# Altium integrated library VIETTIEN.IntLib: 150 symbols (part 4 of 7)

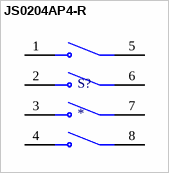
[diagram p69: symbol JS0204AP4-R]

## JS0204AP4-R
designator S?
Công Tắc DIP Switch Dán SMD 4 Bit 2.54mm; MP: JS0204AP4-R; Package: None; Price: None; Value: *; Availability: Unavailable
footprint SW_JS0204AP4-R
pins: 1, 2, 3, 4, 5, 6, 7, 8


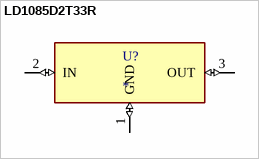
[diagram p70: symbol LD1085D2T33R]

## LD1085D2T33R
designator U?
Linear Voltage Regulator IC Positive Fixed 1 Output 3A D2PAK; MF: STMicroelectronics; MP: LD1085D2T33R; SnapEDA_Link: https://www.snapeda.com/parts/LD1085D2T33R/STMicroelectronics/view-part/?ref=snap; Package: TO-263-3 STMicroelectronics; Value: *; Check_prices: https://www.snapeda.com/parts/LD1085D2T33R/STMicroelectronics/view-part/?ref=eda
footprint LD1085D2T33R
pins: 1 GND (io), 2 IN (io), 3 OUT (io)


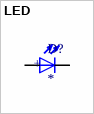
[diagram p71: symbol LED]

## LED
designator D?
WL-TMRC_5MM; MF: {'manufacturer': u'Wurth Electronics'}; MP: 151051RS11000; Package: None; Price: None; Value: *; Availability: Unavailable
footprint WL-TMRC_5MM
pins: 1 POS, 2 NEG
text: +


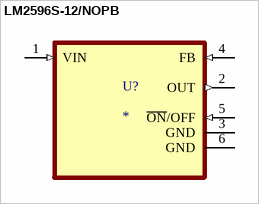
[diagram p72: symbol LM2596S-12/NOPB]

## LM2596S-12/NOPB
designator U?
SIMPLE SWITCHERÂ® 4.5V to 40V, 3A Low Component Count Step-Down Regulator; MF: Texas Instruments; MP: LM2596S-12/NOPB; SnapEDA_Link: https://www.snapeda.com/parts/LM2596S-12/NOPB/Texas+Instruments/view-part/?ref=snap; Package: TO-263-5 Texas Instruments; Value: *; Check_prices: https://www.snapeda.com/parts/LM2596S-12/NOPB/Texas+Instruments/view-part/?ref=eda
footprint VREG_LM2596S-12/NOPB
pins: 1 VIN (in), 2 OUT (out), 3 GND (power), 4 FB (in), 5 ~{ON}/OFF (in), 6 GND (power)


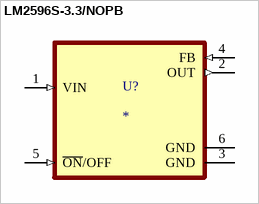
[diagram p73: symbol LM2596S-3.3/NOPB]

## LM2596S-3.3/NOPB
designator U?
SIMPLE SWITCHERÂ® 4.5V to 40V, 3A Low Component Count Step-Down Regulator 5-DDPAK/TO-263; MF: Texas Instruments; MP: LM2596S-3.3; SnapEDA_Link: https://www.snapeda.com/parts/LM2596S-3.3/Texas+Instruments/view-part/?ref=snap; Package: TO-263-5 Texas Instruments; Value: *; Check_prices: https://www.snapeda.com/parts/LM2596S-3.3/Texas+Instruments/view-part/?ref=eda
footprint VREG_LM2596S-3.3/NOPB
pins: 1 VIN (in), 2 OUT (out), 3 GND (power), 4 FB (in), 5 ~{ON}/OFF (in), 6 GND (power)


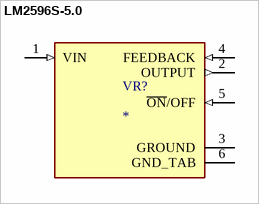
[diagram p74: symbol LM2596S-5.0]

## LM2596S-5.0
designator VR?
SIMPLE SWITCHERÂ® 4.5V to 40V, 3A Low Component Count Step-Down Regulator; MF: Texas Instruments; MP: LM2596S-5.0/NOPB; SnapEDA_Link: https://www.snapeda.com/parts/LM2596S-5.0/NOPB/Texas+Instruments/view-part/?ref=snap; Package: TO-263-5 Texas Instruments; Value: *; Check_prices: https://www.snapeda.com/parts/LM2596S-5.0/NOPB/Texas+Instruments/view-part/?ref=eda
footprint LM2596S-5.0
pins: 1 VIN (in), 2 OUTPUT (out), 3 GROUND (power), 4 FEEDBACK (in), 5 ~{ON}/OFF (in), 6 GND_TAB (power)


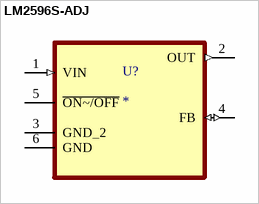
[diagram p75: symbol LM2596S-ADJ]

## LM2596S-ADJ
designator U?
Buck Switching Regulator IC Positive Adjustable 1.2V 1 Output 3A TO-263-6, DÂ²Pak (5 Leads + Tab), TO-263BA; MF: UMW; MP: LM2596S-ADJ; SnapEDA_Link: https://www.snapeda.com/parts/LM2596S-ADJ/Umwelt+Sensor+Teknik/view-part/?ref=snap; Package: None; Value: *; Check_prices: https://www.snapeda.com/parts/LM2596S-ADJ/Umwelt+Sensor+Teknik/view-part/?ref=eda
footprint LM2596S-ADJ
pins: 1 VIN (in), 2 OUT (out), 3 GND_2, 4 FB (io), 5 ~{ON~/OFF}, 6 GND


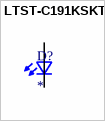
[diagram p76: symbol LTST-C191KSKT]

## LTST-C191KSKT
designator D?
Yellow 591nm LED Indication - Discrete 2.1V 0603 (1608 Metric); MF: Lite-On Inc.; MP: LTST-C191KSKT; SnapEDA_Link: https://www.snapeda.com/parts/LTST-C191KSKT/Lite-On/view-part/?ref=snap; Package: 0603 Lite-On Inc.; Value: *; Check_prices: https://www.snapeda.com/parts/LTST-C191KSKT/Lite-On/view-part/?ref=eda
footprint 0603
pins: 1 K2, 2 A2


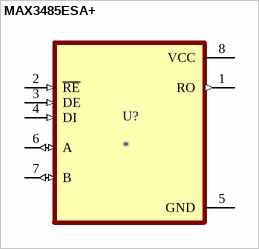
[diagram p77: symbol MAX3485ESA+]

## MAX3485ESA+
designator U?
3.3V Powered, 10Mbps and Slew-Rate Limited, True RS-485/RS-422 Transceivers; MF: Analog Devices; MP: MAX3485ESA+; SnapEDA_Link: https://www.snapeda.com/parts/MAX3485ESA+/Analog+Devices/view-part/?ref=snap; Package: SOIC-8 Maxim; Value: *; Check_prices: https://www.snapeda.com/parts/MAX3485ESA+/Analog+Devices/view-part/?ref=eda
footprint SOIC127P600X175-8N
pins: 1 RO (out), 2 ~{RE} (in), 3 DE (in), 4 DI (in), 5 GND (power), 6 A (io), 7 B (io), 8 VCC (power)


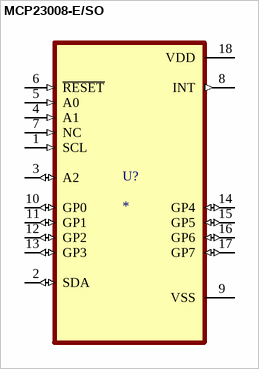
[diagram p78: symbol MCP23008-E/SO]

## MCP23008-E/SO
designator U?
8-BIT INPUT/OUTPUT EXPANDER, I2C INTERFACE | Microchip Technology Inc. MCP23008-E/SO; SnapEDA_Link: https://www.snapeda.com/parts/MCP23008-E/SO/Microchip+Technology/view-part/?ref=snap; Package: SOIC-18 Microchip; Value: *; MF: Microchip; MP: MCP23008-E/SO; Check_prices: https://www.snapeda.com/parts/MCP23008-E/SO/Microchip+Technology/view-part/?ref=eda
footprint SOIC127P1030X265-18N
pins: 1 SCL (in), 2 SDA (io), 3 A2 (io), 4 A1 (in), 5 A0 (in), 6 ~{RESET} (in), 7 NC (in), 8 INT (out), 9 VSS (power), 10 GP0 (io), 11 GP1 (io), 12 GP2 (io), 13 GP3 (io), 14 GP4 (io), 15 GP5 (io), 16 GP6 (io), 17 GP7 (io), 18 VDD (power)


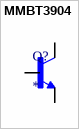
[diagram p79: symbol MMBT3904]

## MMBT3904
designator Q?
BJT, SOT-23, 40V, 200mA, NPN, 0.35W, 150Â°C; MF: Diotec Semiconductor; MP: MMBT3904; SnapEDA_Link: https://www.snapeda.com/parts/MMBT3904/Diotec/view-part/?ref=snap; Package: SOT-23 Diotec; Value: *; Check_prices: https://www.snapeda.com/parts/MMBT3904/Diotec/view-part/?ref=eda
footprint TRANS_MMBT3904
pins: 1 B, 2 E, 3 C


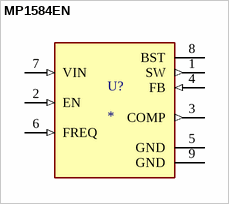
[diagram p80: symbol MP1584EN]

## MP1584EN
designator U?
Buck Switching Regulator IC Positive Adjustable 0.8V 1 Output 3A 8-SOIC (0.154, 3.90mm Width) Exposed Pad; MF: Monolithic Power; MP: MP1584EN; SnapEDA_Link: https://www.snapeda.com/parts/MP1584EN/Monolithic+Power+Systems/view-part/?ref=snap; Package: SOIC-8 Monolithic Power; Value: *; Check_prices: https://www.snapeda.com/parts/MP1584EN/Monolithic+Power+Systems/view-part/?ref=eda
footprint SOIC127P600X170-9N
pins: 1 SW (out), 2 EN (in), 3 COMP (out), 4 FB (in), 5 GND (power), 6 FREQ (in), 7 VIN (in), 8 BST, 9 GND (power)


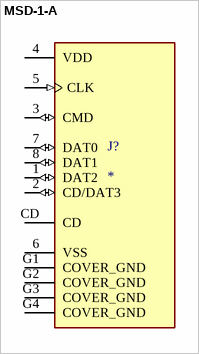
[diagram p81: symbol MSD-1-A]

## MSD-1-A
designator J?
Micro SD Card Connector, 9 Positions, Connector and Ejector, Push In, Auto Eject Out, Surface Mount, 1.8 mm Height Above Board, Gold Flash; MF: Same Sky; MP: MSD-1-A; SnapEDA_Link: https://www.snapeda.com/parts/MSD-1-A/Same+Sky/view-part/?ref=snap; Package: None; Value: *; Check_prices: https://www.snapeda.com/parts/MSD-1-A/Same+Sky/view-part/?ref=eda
footprint CUI_MSD-1-A
pins: 1 DAT2 (io), 2 CD/DAT3 (io), 3 CMD (io), 4 VDD (power), 5 CLK (in), 6 VSS (power), 7 DAT0 (io), 8 DAT1 (io), CD, G1 COVER_GND (power), G2 COVER_GND (power), G3 COVER_GND (power), G4 COVER_GND (power)


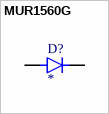
[diagram p82: symbol MUR1560G]

## MUR1560G
designator D?
Diode Standard 600 V 15A Through Hole TO-220-2; MF: ON Semiconductor; MP: MUR1560G; Check_prices: https://www.snapeda.com/parts/MUR1560G/Onsemi/view-part/?ref=eda; Value: *; Purchase-URL: https://pricing.snapeda.com/search/part/MUR1560G/?ref=eda; Price: None; Package: TO-220-2 ON Semiconductor; Availability: In Stock; SnapEDA_Link: https://www.snapeda.com/parts/MUR1560G/Onsemi/view-part/?ref=snap
footprint TO508P997X444X1905-2
pins: 1 K, 3 A


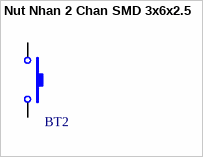
[diagram p83: symbol Nut Nhan 2 Chan SMD 3x6x2.5]

## Nut Nhan 2 Chan SMD 3x6x2.5
designator BT2  (value not drawn)
Ma_Hang: MH001036; Ten: Nút Nhấn 2 Chân 3x6x2.5MM SMD
footprint PCBComponent_1
pins: 1, 2


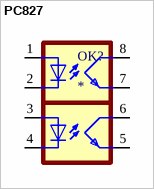
[diagram p84: symbol PC827]

## PC827
designator OK?
PowerPC G2_LE Microprocessor IC MPC82xx 1 Core, 32-Bit 450MHz 480-TBGA (37.5x37.5); MF: Sharp Microelectronics; MP: PC827; Price: None; SnapEDA_Link: https://www.snapeda.com/parts/PC827/Sharp%20Microelectronics/view-part/1087397/?ref=snap; Availability: Unavailable; Value: *; Package: DIP-8 Sharp; Check_prices: https://www.snapeda.com/parts/PC827/Sharp%20Microelectronics/view-part/1087397/?ref=eda
footprint DIL08
pins: 1 A, 2 C, 3 A, 4 C, 5 EMIT, 6 COL, 7 EMIT, 8 COL


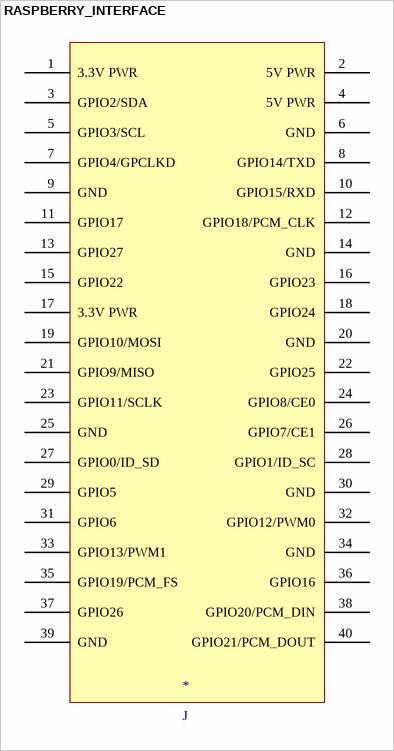
[diagram p85: symbol RASPBERRY_INTERFACE]

## RASPBERRY_INTERFACE
designator *, comment J
RASPBERRY_INTERFACE
footprint GPIO_INTERFACE
pins: 1 3.3V PWR, 2 5V PWR, 3 GPIO2/SDA, 4 5V PWR, 5 GPIO3/SCL, 6 GND, 7 GPIO4/GPCLKD, 8 GPIO14/TXD, 9 GND, 10 GPIO15/RXD, 11 GPIO17, 12 GPIO18/PCM_CLK, 13 GPIO27, 14 GND, 15 GPIO22, 16 GPIO23, 17 3.3V PWR, 18 GPIO24, 19 GPIO10/MOSI, 20 GND, 21 GPIO9/MISO, 22 GPIO25, 23 GPIO11/SCLK, 24 GPIO8/CE0, 25 GND, 26 GPIO7/CE1, 27 GPIO0/ID_SD, 28 GPIO1/ID_SC, 29 GPIO5, 30 GND, 31 GPIO6, 32 GPIO12/PWM0, 33 GPIO13/PWM1, 34 GND, 35 GPIO19/PCM_FS, 36 GPIO16, 37 GPIO26, 38 GPIO20/PCM_DIN, 39 GND, 40 GPIO21/PCM_DOUT


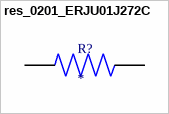
[diagram p86: symbol res_0201_ERJU01J272C]

## res_0201_ERJU01J272C
designator R?
MP: ERJU01J272C; Availability: Unavailable; Price: None; Package: None; Value: *
footprint RES_ERJU01J272C
pins: 1, 2


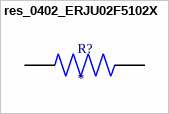
[diagram p87: symbol res_0402_ERJU02F5102X]

## res_0402_ERJU02F5102X
designator R?
MP: ERJU02F5102X; Availability: Unavailable; Price: None; Package: None; Value: *
footprint RES_ERJU02F5102X
pins: 1, 2


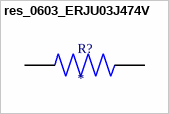
[diagram p88: symbol res_0603_ERJU03J474V]

## res_0603_ERJU03J474V
designator R?
0603 Anti-Sulfurated; MF: Panasonic; MP: ERJU03J474V; SnapEDA_Link: https://www.snapeda.com/parts/ERJU03J474V/Panasonic/view-part/?ref=snap; Package: 1608-2 Panasonic; Value: *; Check_prices: https://www.snapeda.com/parts/ERJU03J474V/Panasonic/view-part/?ref=eda
footprint RES_ERJU03J474V
pins: 1, 2


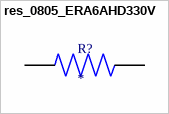
[diagram p89: symbol res_0805_ERA6AHD330V]

## res_0805_ERA6AHD330V
designator R?
RES 0805; MP: ERA6AHD330V; Package: None; Price: None; Value: *; Availability: Unavailable
footprint RES_ERA6AHD330V
pins: 1, 2


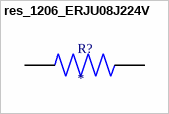
[diagram p90: symbol res_1206_ERJU08J224V]

## res_1206_ERJU08J224V
designator R?
RES 1206; MP: ERJU08J224V; Value: *; Price: None; Package: None; Availability: Unavailable
footprint RES_ERJU08J224V
pins: 1, 2


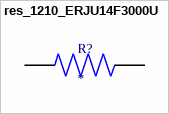
[diagram p91: symbol res_1210_ERJU14F3000U]

## res_1210_ERJU14F3000U
designator R?
RES_1210; MP: ERJU14F3000U; Availability: Unavailable; Package: None; Value: *; Price: None
footprint RES_ERJU14F3000U
pins: 1, 2
